# Altium footprint library TPS74801DRCR.PcbLib: 1 footprints
Each footprint in its own frame and in the unit in brackets; x right, y up, seen from the top. Pads: shape width x height; smd on the part's side, far side on the other; paste and mask are expansions set on the pad; w line width, h text height; cw(c..) or ccw(c..) is an arc to the next point about the centre after c.
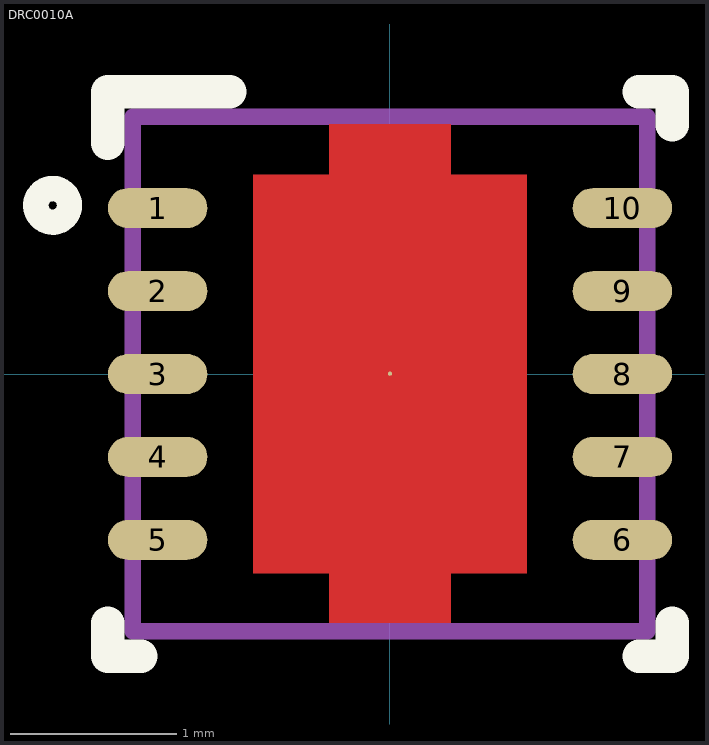
[diagram p0: the footprint, top view; thin cyan lines are the x and y axes]

## DRC0010A [mm] "Linear Voltage Regulator IC Positive Adjustable 1 Output 1.5A 10-VSON (3x3)"
pads (11):
  oval 0.6x0.24 smd paste-0.102 mask+0.051: 1(-1.4,1) 2(-1.4,0.5) 3(-1.4,0) 4(-1.4,-0.5) 5(-1.4,-1) 6(1.4,-1) 7(1.4,-0.5) 8(1.4,0) 9(1.4,0.5) 10(1.4,1)
  round 0.025 smd paste+0 mask+0.051: 11(0,0.002)
Top Layer:
  region: -0.367,-1.5 0.367,-1.5 0.367,-1.2 0.825,-1.2 0.825,1.2 0.366,1.2 0.366,1.504 -0.364,1.504 -0.364,1.2 -0.825,1.2 -0.825,-1.2 -0.367,-1.2
Top Overlay:
  circle w0.152: c-2.032,1.016 r0.102
  lines w0.2: -1.7,-1.5 -1.7,-1.7 -1.5,-1.7 ; -1.7,1.39 -1.7,1.7 -0.965,1.7 ; 1.5,-1.7 1.7,-1.7 1.7,-1.5 ; 1.5,1.7 1.7,1.7 1.7,1.5
Mechanical 13:
  lines w0.1: -1.55,-1.55 1.55,-1.55 1.55,1.55 -1.55,1.55 -1.55,-1.55
3D body "DRC0010J.stp": height 1, standoff 0, extent -1.5,-1.5 1.5,1.5